# Altium schematic symbol library daughter_board.SchLib: 7 symbols
Pins are listed as number, name and electrical type; pins without a type are passive.

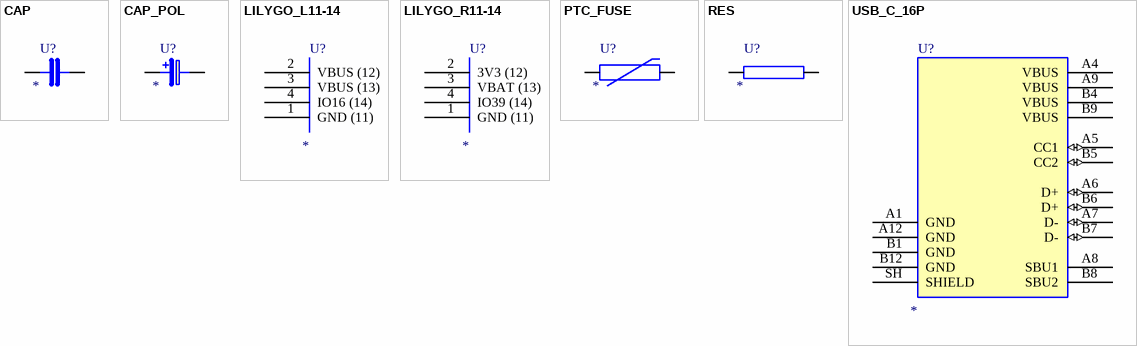
[diagram p0: symbols CAP to USB_C_16P]

## CAP
designator U?
Capacitor
pins: 1, 2

## CAP_POL
designator U?
Polarized capacitor (tantalum), pin 1 = anode (+)
pins: 1 +, 2 -

## LILYGO_L11-14
designator U?
LilyGo T-Display-S3 AMOLED Plus left header pins 11-14 (2.54 mm, female socket on the daughter board)
pins: 1 GND (11) (power), 2 VBUS (12) (power), 3 VBUS (13) (power), 4 IO16 (14)

## LILYGO_R11-14
designator U?
LilyGo T-Display-S3 AMOLED Plus right header pins 11-14 (2.54 mm, female socket on the daughter board), 22.86 mm from the left row
pins: 1 GND (11) (power), 2 3V3 (12), 3 VBAT (13), 4 IO39 (14)

## PTC_FUSE
designator U?
Resettable PTC fuse (polyfuse)
pins: 1, 2

## RES
designator U?
Resistor
pins: 1, 2

## USB_C_16P
designator U?
USB Type-C 2.0 receptacle, 16 pins + shell (GCT USB4105-GF-A)
pins: A1 GND (power), A4 VBUS (power), A5 CC1 (io), A6 D+ (io), A7 D- (io), A8 SBU1, A9 VBUS (power), A12 GND (power), B1 GND (power), B4 VBUS (power), B5 CC2 (io), B6 D+ (io), B7 D- (io), B8 SBU2, B9 VBUS (power), B12 GND (power), SH SHIELD